# Altium footprint library PWR763A.PcbLib: 36 footprints (part 1 of 3)
Each footprint in its own frame and in the unit in brackets; x right, y up, seen from the top. Pads: shape width x height; smd on the part's side, far side on the other; paste and mask are expansions set on the pad; w line width, h text height; cw(c..) or ccw(c..) is an arc to the next point about the centre after c.
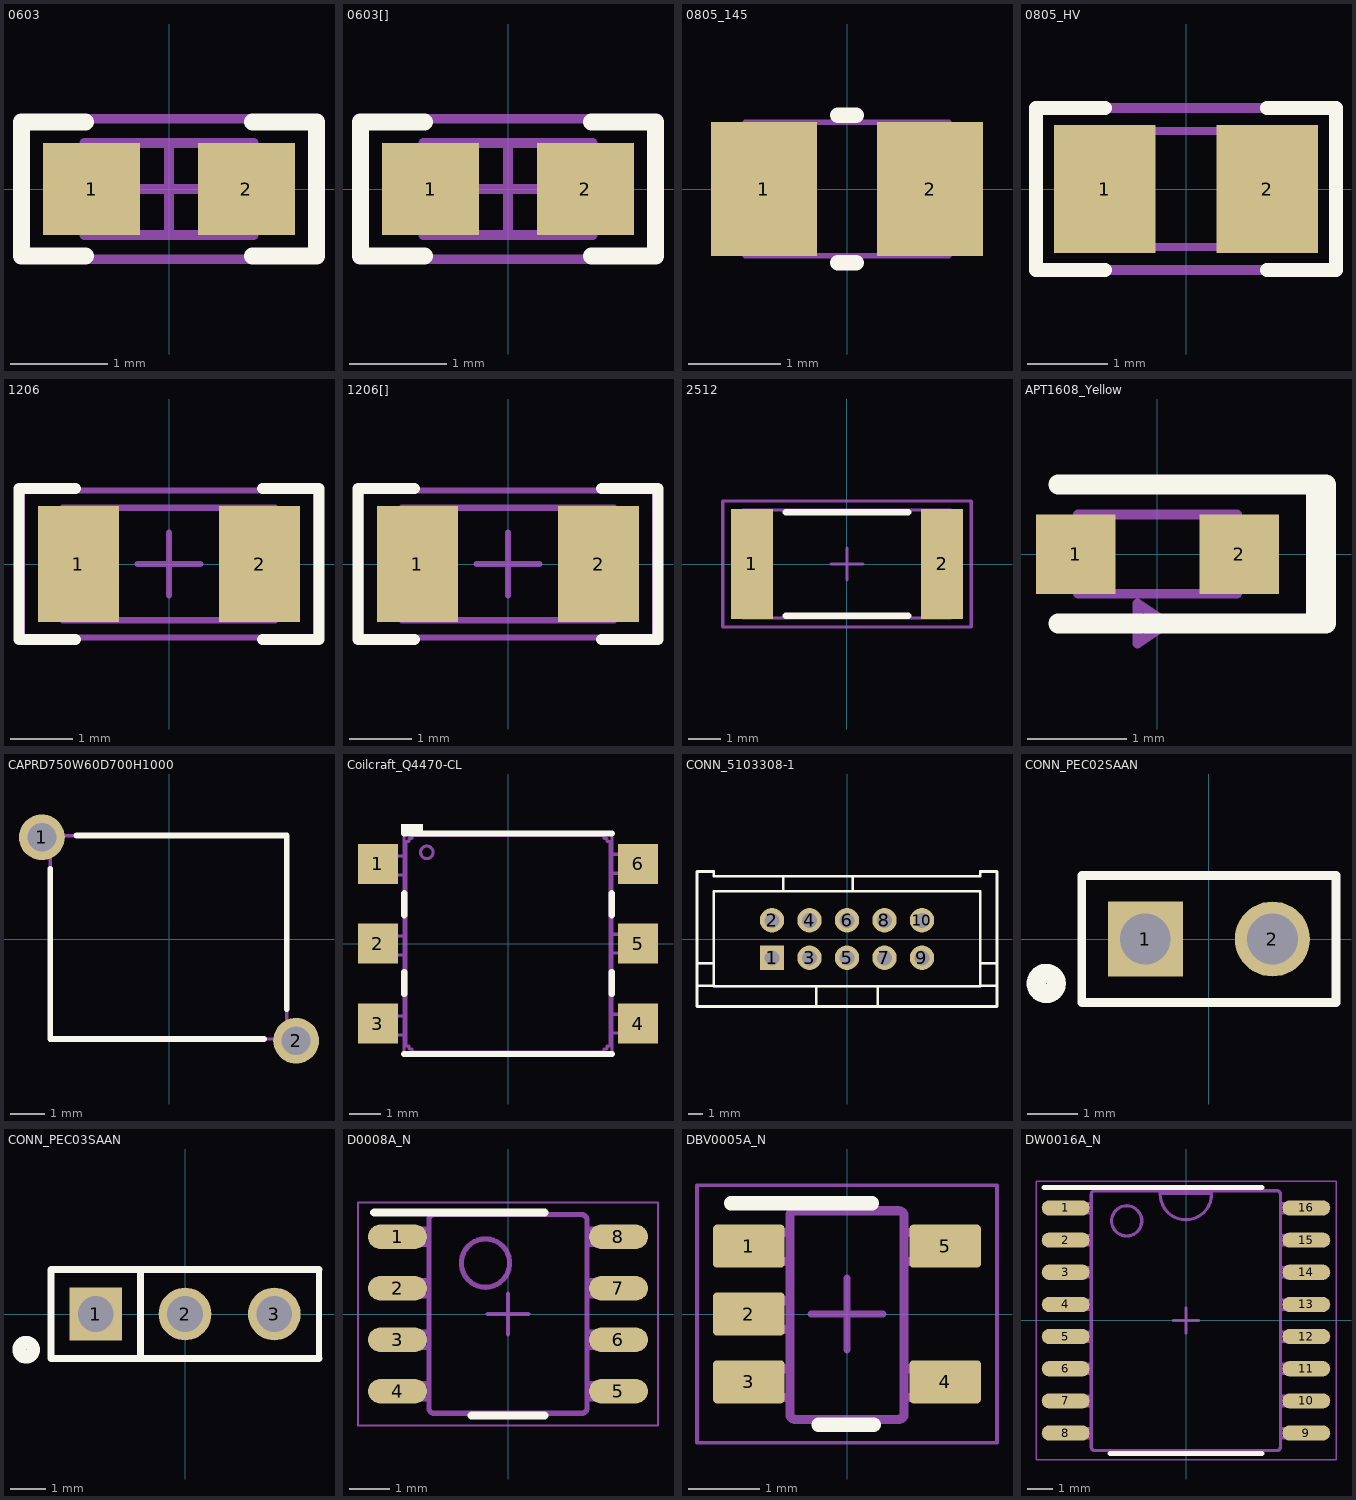
[diagram p0: the footprints below, top view; thin cyan lines are the x and y axes]

## 0603 [mm] "0603 from SM-752 data"
height 0.85
pads (2):
  rect 1x0.95 smd: 1(-0.8,0) 2(0.8,0)
Top Overlay:
  lines w0.178: -0.864,-0.691 -1.524,-0.691 -1.524,0.693 -0.864,0.693 ; 0.864,-0.691 1.524,-0.691 1.524,0.693 0.864,0.693
Mechanical 5:
  lines w0.1: -1.55,-0.725 1.55,-0.725 1.55,0.725 -1.55,0.725 -1.55,-0.725
Mechanical 13:
  lines w0.1: -0.55,-0.475 -0.55,0.475 ; 0.55,-0.475 0.55,0.475 ; -0.875,-0.475 -0.875,0.475 0.875,0.475 0.875,-0.475 -0.875,-0.475
Mechanical 15:
  lines w0.1: -0.475,0 0.475,0 ; 0,-0.475 0,0.475 ; -1.55,-0.725 -1.55,0.725 1.55,0.725 1.55,-0.725 -1.55,-0.725
3D body: height 0.85, standoff 0, extent 0.551,-0.474 0.874,0.474
3D body: height 0.85, standoff 0, extent -0.549,-0.474 0.549,0.474
3D body: height 0.85, standoff 0, extent -0.874,-0.474 -0.551,0.474

## 0603[] [mm] "0603 from SM-752 data"
height 0.85
pads (2):
  rect 1x0.95 smd: 1(-0.8,0) 2(0.8,0)
Top Overlay:
  lines w0.178: -0.864,-0.691 -1.524,-0.691 -1.524,0.693 -0.864,0.693 ; 0.864,-0.691 1.524,-0.691 1.524,0.693 0.864,0.693
Mechanical 5:
  lines w0.1: -1.55,-0.725 1.55,-0.725 1.55,0.725 -1.55,0.725 -1.55,-0.725
Mechanical 13:
  lines w0.1: -0.55,-0.475 -0.55,0.475 ; 0.55,-0.475 0.55,0.475 ; -0.875,-0.475 -0.875,0.475 0.875,0.475 0.875,-0.475 -0.875,-0.475
Mechanical 15:
  lines w0.1: -0.475,0 0.475,0 ; 0,-0.475 0,0.475 ; -1.55,-0.725 -1.55,0.725 1.55,0.725 1.55,-0.725 -1.55,-0.725
3D body: height 0.85, standoff 0, extent 0.551,-0.474 0.874,0.474
3D body: height 0.85, standoff 0, extent -0.549,-0.474 0.549,0.474
3D body: height 0.85, standoff 0, extent -0.874,-0.474 -0.551,0.474

## 0805_145 [mm] "0805 / 1.45mm height"
height 1.45
pads (2):
  rect 1.15x1.45 smd: 1(-0.9,0) 2(0.9,0)
Top Overlay:
  lines w0.17: -0.1,-0.8 0.1,-0.8 ; -0.1,0.8 0.1,0.8
Mechanical 5:
  lines w0.06: -1.1,-0.725 1.1,-0.725 1.1,0.725 -1.1,0.725 -1.1,-0.725
3D body: height 1.45, standoff 0, extent -1.099,-0.724 -0.501,0.724
3D body: height 1.45, standoff 0, extent -0.499,-0.724 0.5,0.725
3D body: height 1.45, standoff 0, extent 0.501,-0.724 1.099,0.724

## 0805_HV [mil] "0805 with 30mil clearance between pads"
height 57.09
pads (2):
  rect 50x63 smd: 1(-40,0) 2(40,0)
Top Overlay:
  lines w7: -40,-40 -74,-40 -74,0 -74,40 -40,40 ; 40,-40 74,-40 74,0 74,40 40,40
Mechanical 5:
  lines w5: -74,-40 -74,40 74,40 74,-40 -74,-40
Mechanical 13:
  lines w3.94: -25.59,-28.54 -25.59,28.54 ; 25.59,-28.54 25.59,28.54 ; -43.31,-28.54 -43.31,28.54 43.31,28.54 43.31,-28.54 -43.31,-28.54
3D body: height 57.09, standoff 0, extent 25.61,-28.52 43.29,28.52
3D body: height 57.09, standoff 0, extent -25.57,-28.52 25.57,28.52
3D body: height 57.09, standoff 0, extent -43.29,-28.52 -25.61,28.52

## 1206 [mm] "1206 from SM-752 data"
height 1.35
pads (2):
  rect 1.3x1.85 smd: 1(-1.45,0) 2(1.45,0)
Top Overlay:
  lines w0.178: -1.5,-1.21 -2.4,-1.21 -2.4,1.21 -1.5,1.21 ; 1.5,-1.21 2.4,-1.21 2.4,1.21 1.5,1.21
Mechanical 5:
  lines w0.1: -1.7,-0.9 1.7,-0.9 1.7,0.9 -1.7,0.9 -1.7,-0.9
Mechanical 13:
  lines w0.1: -1.2,-0.9 -1.2,0.9 ; 1.2,-0.9 1.2,0.9 ; -1.7,-0.9 1.7,-0.9 1.7,0.9 -1.7,0.9 -1.7,-0.9
Mechanical 15:
  lines w0.1: -0.5,0 0.5,0 ; 0,-0.5 0,0.5 ; -2.35,-1.175 2.35,-1.175 2.35,1.175 -2.35,1.175 -2.35,-1.175
3D body: height 1.35, standoff 0, extent -1.699,-0.899 -1.201,0.899
3D body: height 1.35, standoff 0, extent -1.199,-0.899 1.199,0.899
3D body: height 1.35, standoff 0, extent 1.201,-0.899 1.699,0.899

## 1206[] [mm] "1206 from SM-752 data"
height 1.35
pads (2):
  rect 1.3x1.85 smd: 1(-1.45,0) 2(1.45,0)
Top Overlay:
  lines w0.178: -1.5,-1.21 -2.4,-1.21 -2.4,1.21 -1.5,1.21 ; 1.5,-1.21 2.4,-1.21 2.4,1.21 1.5,1.21
Mechanical 5:
  lines w0.1: -1.7,-0.9 1.7,-0.9 1.7,0.9 -1.7,0.9 -1.7,-0.9
Mechanical 13:
  lines w0.1: -1.2,-0.9 -1.2,0.9 ; 1.2,-0.9 1.2,0.9 ; -1.7,-0.9 1.7,-0.9 1.7,0.9 -1.7,0.9 -1.7,-0.9
Mechanical 15:
  lines w0.1: -0.5,0 0.5,0 ; 0,-0.5 0,0.5 ; -2.35,-1.175 2.35,-1.175 2.35,1.175 -2.35,1.175 -2.35,-1.175
3D body: height 1.35, standoff 0, extent -1.699,-0.899 -1.201,0.899
3D body: height 1.35, standoff 0, extent -1.199,-0.899 1.199,0.899
3D body: height 1.35, standoff 0, extent 1.201,-0.899 1.699,0.899

## 2512 [mm] "Chip Resistor, Body 6.3x3.2mm, IPC Medium Density"
height 0.71
pads (2):
  rect 1.3x3.4 smd: 1(-2.95,0) 2(2.95,0)
Top Overlay:
  lines w0.2: -1.9,-1.6 1.9,-1.6 ; -1.9,1.6 1.9,1.6
Mechanical 5:
  lines w0.1: -3.225,-1.675 3.225,-1.675 3.225,1.675 -3.225,1.675 -3.225,-1.675
Mechanical 13:
  lines w0.1: -2.463,-1.675 -2.463,1.675 ; 2.463,-1.675 2.463,1.675 ; -3.225,-1.675 3.225,-1.675 3.225,1.675 -3.225,1.675 -3.225,-1.675
Mechanical 15:
  lines w0.1: -0.5,0 0.5,0 ; 0,-0.5 0,0.5 ; -3.85,-1.95 3.85,-1.95 3.85,1.95 -3.85,1.95 -3.85,-1.95
3D body: height 0.71, standoff 0, extent -3.224,-1.674 -2.464,1.674
3D body: height 0.71, standoff 0, extent -2.462,-1.674 2.462,1.674
3D body: height 0.71, standoff 0, extent 2.464,-1.674 3.224,1.674

## APT1608_Yellow [mm] "SMD, 2-Leads, Body 0.8x1.6mm"
height 0.75
pads (2):
  rect 0.8x0.8 smd: 1(-0.825,0) 2(0.825,0)
Top Overlay:
  rectangle: 1.5,-0.7 1.8,0.7
  lines w0.2: -1,-0.7 1.7,-0.7 ; -1,0.7 1.7,0.7
Mechanical 5:
  rectangle: 0.6,-0.4 0.8,0.4
  lines w0.1: -0.8,-0.4 0.8,-0.4 0.8,0.4 -0.8,0.4 -0.8,-0.4 ; -0.2,-0.9 -0.2,-0.5 0.1,-0.7 -0.2,-0.9
3D body: height 0.75, standoff 0, extent -0.801,-0.4 0.81,0.4
3D body: height 0.76, standoff 0.7, extent 0.15,-0.1 0.35,0.1

## CAPRD750W60D700H1000 [mm] "muRata"
height 10
pads (2):
  round 1.35 hole 0.85: 1(-3.75,3) 2(3.75,-3)
Top Overlay:
  lines w0.17: -3.5,2.075 -3.5,-2.95 2.8,-2.95 ; -2.725,3.05 3.475,3.05 3.475,-2.075
Mechanical 5:
  lines w0.1: -3.5,-2.95 -3.5,3.05 3.475,3.05 3.475,-2.95 -3.5,-2.95
3D body: height 7, standoff 3, extent -4.259,2.491 -3.241,3.509
3D body: height 7, standoff 3, extent 3.241,-3.509 4.259,-2.491
3D body: height 9.97, standoff 3, extent -3.493,-2.95 3.493,3.05
3D body: height 6, standoff -2, extent -4.047,2.701 -3.45,3.3
3D body: height 6, standoff -2, extent 3.453,-3.299 4.05,-2.7

## Coilcraft_Q4470-CL [mm] "SMD, 6-Leads, Body 6.6x6.99mm, Pitch 2.54mm"
height 5.46
pads (6):
  rect 1.27x1.27 smd: 1(-4.13,2.54) 2(-4.13,0) 3(-4.13,-2.54) 4(4.13,-2.54) 5(4.13,0) 6(4.13,2.54)
Top Overlay:
  rectangle: -3.4,3.5 -2.7,3.8
  lines w0.2: -3.3,-3.5 3.3,-3.5 ; -3.3,-1.6 -3.3,-0.9 ; -3.3,0.9 -3.3,1.6 ; -3.3,3.5 3.3,3.5 ; 3.3,-1.6 3.3,-0.9 ; 3.3,0.9 3.3,1.6
Mechanical 5:
  lines w0.1: -3.3,-2.895 -3.605,-2.895 ; -3.3,-2.295 -3.605,-2.295 ; -3.3,-0.355 -3.605,-0.355 ; -3.3,0.245 -3.605,0.245 ; -3.3,2.185 -3.605,2.185 ; -3.3,2.785 -3.605,2.785 ; -1.35,-3.445 -1.35,-3.495 -3.3,-3.495 -3.3,3.495 -1.35,3.495 -1.35,3.445 ; 1.35,-3.445 1.35,-3.495 3.3,-3.495 3.3,3.495 1.35,3.495 1.35,3.445 ; 3.3,-2.84 3.639,-2.84 ; 3.3,-2.24 3.639,-2.24 ; 3.3,-0.3 3.639,-0.3 ; 3.3,0.3 3.639,0.3 ; 3.3,2.24 3.639,2.24 ; 3.3,2.84 3.639,2.84 ; -3.855,-2.895 -4.25,-2.895 -4.25,-2.295 -3.855,-2.295 ; -3.855,-2.895 -3.605,-2.895 ; -3.855,-2.895 -3.855,-2.295 ; -3.855,-2.295 -3.605,-2.295 ; -3.855,-0.355 -3.605,-0.355 ; -3.855,-0.355 -3.855,0.245 ; -3.855,-0.355 -4.25,-0.355 -4.25,0.245 -3.855,0.245 ; -3.855,0.245 -3.605,0.245 ; -3.855,2.185 -4.25,2.185 -4.25,2.785 -3.855,2.785 ; -3.855,2.185 -3.855,2.785 ; -3.855,2.185 -3.605,2.185 ; -3.855,2.785 -3.605,2.785 ; -3.605,-2.895 -3.605,-2.295 ; -3.605,-0.355 -3.605,0.245 ; -3.605,2.185 -3.605,2.785 ; 3.639,-2.84 3.639,-2.24 ; 3.639,-2.84 3.889,-2.84 ; 3.639,-2.24 3.889,-2.24 ; 3.639,-0.3 3.639,0.3 ; 3.639,-0.3 3.889,-0.3 ; 3.639,0.3 3.889,0.3 ; 3.639,2.24 3.639,2.84 ; 3.639,2.24 3.889,2.24 ; 3.639,2.84 3.889,2.84 ; 3.889,-2.84 4.25,-2.84 4.25,-2.24 3.889,-2.24 ; 3.889,-2.84 3.889,-2.24 ; 3.889,-0.3 3.889,0.3 ; 3.889,-0.3 4.25,-0.3 4.25,0.3 3.889,0.3 ; 3.889,2.24 3.889,2.84 ; 3.889,2.24 4.25,2.24 4.25,2.84 3.889,2.84 ; -3.25,-3.245 -3.15,-3.245 -3.15,-3.345 -3.05,-3.345 -3.05,-3.445 3.05,-3.445 3.05,-3.345 3.15,-3.345 3.15,-3.245 3.25,-3.245 3.25,3.245 3.15,3.245 3.15,3.345 3.05,3.345 3.05,3.445 -3.05,3.445 -3.05,3.345 -3.15,3.345 -3.15,3.245 -3.25,3.245 -3.25,-3.245 ; -2.579,2.705 ccw(c-2.579,2.904) -2.579,3.103 ccw(c-2.579,2.904) -2.579,2.705
3D body: height 5.46, standoff 0, extent -4.25,-3.495 4.25,3.495

## CONN_5103308-1 [mm] "TE Connectivity (AMP) Rev E datasheet"
height 9.982
pads (10):
  rect 1.65x1.65 hole 1.016: 1(-5.08,-1.27)
  round 1.65 hole 1.016: 2(-5.08,1.27) 3(-2.54,-1.27) 4(-2.54,1.27) 5(0,-1.27) 6(0,1.27) 7(2.54,-1.27) 8(2.54,1.27) 9(5.08,-1.27) 10(5.08,1.27)
Top Overlay:
  lines w0.178: -10.16,-3.175 -10.16,-4.572 -2.603,-4.572 -2.095,-4.572 ; -10.16,-3.175 -10.16,-1.651 ; -10.16,-3.175 -9.398,-3.175 -9.017,-3.175 ; -10.16,-1.651 -10.16,4.572 -9.017,4.572 -9.017,4.255 -4.826,4.255 -4.318,4.255 ; -10.16,-1.651 -9.398,-1.651 -9.017,-1.651 ; -9.017,-3.175 -9.017,-3.213 -2.112,-3.213 -2.095,-3.213 ; -9.017,-3.175 -9.017,-1.651 ; -9.017,-1.651 -9.017,3.238 -4.334,3.238 -4.318,3.238 ; -4.318,3.238 0.381,3.238 ; -4.318,3.238 -4.318,4.255 ; -4.318,4.255 -3.556,4.255 -0.381,4.255 0.381,4.255 ; -2.095,-4.572 -1.333,-4.572 1.333,-4.572 2.095,-4.572 ; -2.095,-4.572 -2.095,-3.213 ; -2.095,-3.213 2.095,-3.213 ; 0.381,3.238 0.381,4.255 ; 0.381,3.238 0.397,3.238 9.017,3.238 9.017,-1.651 ; 0.381,4.255 0.889,4.255 9.017,4.255 9.017,4.572 10.16,4.572 10.16,-1.651 ; 2.095,-4.572 2.603,-4.572 10.16,-4.572 10.16,-3.175 ; 2.095,-4.572 2.095,-3.213 ; 2.095,-3.213 2.112,-3.213 9.017,-3.213 9.017,-3.175 ; 9.017,-3.175 9.017,-1.651 ; 9.017,-3.175 9.398,-3.175 10.16,-3.175 ; 9.017,-1.651 9.398,-1.651 10.16,-1.651 ; 10.16,-3.175 10.16,-1.651
Mechanical 5:
  rectangle: -5.588,-1.778 -4.572,-0.762
  lines w0.127: -10.16,-3.175 -9.398,-3.175 -9.017,-3.175 ; -10.16,-3.175 -10.16,-1.651 ; -10.16,-3.175 -10.16,-4.572 -2.603,-4.572 -2.095,-4.572 ; -10.16,-1.651 -9.398,-1.651 -9.017,-1.651 ; -10.16,-1.651 -10.16,4.572 -9.017,4.572 -9.017,4.255 -4.826,4.255 -4.318,4.255 ; -9.017,-3.175 -9.017,-1.651 ; -9.017,-3.175 -9.017,-3.213 -2.112,-3.213 -2.095,-3.213 ; -9.017,-1.651 -9.017,3.238 -4.334,3.238 -4.318,3.238 ; -4.318,3.238 -4.318,4.255 ; -4.318,3.238 0.381,3.238 ; -4.318,4.255 -3.556,4.255 -0.381,4.255 0.381,4.255 ; -2.095,-4.572 -2.095,-3.213 ; -2.095,-4.572 -1.333,-4.572 1.333,-4.572 2.095,-4.572 ; -2.095,-3.213 2.095,-3.213 ; 0.381,3.238 0.397,3.238 9.017,3.238 9.017,-1.651 ; 0.381,3.238 0.381,4.255 ; 0.381,4.255 0.889,4.255 9.017,4.255 9.017,4.572 10.16,4.572 10.16,-1.651 ; 2.095,-4.572 2.095,-3.213 ; 2.095,-4.572 2.603,-4.572 10.16,-4.572 10.16,-3.175 ; 2.095,-3.213 2.112,-3.213 9.017,-3.213 9.017,-3.175 ; 9.017,-3.175 9.398,-3.175 10.16,-3.175 ; 9.017,-3.175 9.017,-1.651 ; 9.017,-1.651 9.398,-1.651 10.16,-1.651 ; 10.16,-3.175 10.16,-1.651 ; -5.391,-1.581 -4.769,-1.581 -4.769,-0.959 -5.391,-0.959 -5.391,-1.581
3D body: height 9.87, standoff -3.03, extent -10.16,-4.572 10.16,4.572

## CONN_PEC02SAAN [mm] "SULLINS"
height 8.38
pads (2):
  rect 1.5x1.5 hole 1.016: 1(-1.27,0)
  round 1.5 hole 1.016: 2(1.27,0)
Top Overlay:
  circle w0.381: c-3.251,-0.889 r0.203
  lines w0.178: -2.54,-1.27 2.54,-1.27 2.54,1.27 -2.54,1.27 -2.54,-1.27
Mechanical 5:
  lines w0.127: -2.54,-1.27 -2.54,1.27 2.54,1.27 2.54,-1.27 -2.54,-1.27
3D body: height 8.38, standoff -3.05, extent 0.966,-0.304 1.574,0.304
3D body: height 8.38, standoff -3.05, extent -1.574,-0.304 -0.966,0.304
3D body: height 2.54, standoff 0, extent -2.539,-1.269 2.539,1.269

## CONN_PEC03SAAN [mm] "SULLINS"
height 8.38
pads (3):
  rect 1.5x1.5 hole 1.016: 1(-2.54,0)
  round 1.5 hole 1.016: 2(0,0) 3(2.54,0)
Top Overlay:
  circle w0.381: c-4.521,-1.016 r0.203
  lines w0.178: 3.81,-1.27 3.81,0.254 3.81,1.27
  lines w0.203: -1.27,1.27 -1.27,-1.27 ; 3.81,-1.27 -1.27,-1.27 ; 3.81,1.27 -3.81,1.27 -3.81,-1.27 -1.27,-1.27
Mechanical 5:
  rectangle: -3.048,-0.508 -2.032,0.508
  lines w0.127: -3.81,-1.27 -3.81,1.27 3.81,1.27 3.81,-1.27 -3.81,-1.27
3D body: height 8.38, standoff -3.05, extent 2.236,-0.304 2.844,0.304
3D body: height 8.38, standoff -3.05, extent -0.304,-0.304 0.304,0.304
3D body: height 8.38, standoff -3.05, extent -2.844,-0.304 -2.236,0.304
3D body: height 2.54, standoff 0, extent -3.835,-1.295 3.835,1.295

## D0008A_N [mm] "SOIC, 8-Leads, Body 4.9x3.9mm, Pitch 1.27mm, IPC Medium Density"
height 1.75
pads (8):
  oval 1.45x0.6 smd: 1(-2.725,1.905) 2(-2.725,0.635) 3(-2.725,-0.635) 4(-2.725,-1.905) 5(2.725,-1.905) 6(2.725,-0.635) 7(2.725,0.635) 8(2.725,1.905)
Top Overlay:
  lines w0.2: -3.3,2.5 0.9,2.5 ; -0.9,-2.5 0.9,-2.5
Mechanical 5:
  lines w0.127: -2.375,-2.095 -2.375,-1.715 ; -2.375,-2.095 -2.589,-2.095 -3.002,-2.095 -3.002,-1.715 -2.589,-1.715 -2.375,-1.715 ; -2.375,-2.095 -1.995,-2.095 -1.952,-2.095 -1.952,-1.715 -1.995,-1.715 -2.375,-1.715 ; -2.375,-0.825 -2.375,-0.445 ; -2.375,-0.825 -2.589,-0.825 -3.002,-0.825 -3.002,-0.445 -2.589,-0.445 -2.375,-0.445 ; -2.375,-0.825 -1.995,-0.825 -1.952,-0.825 -1.952,-0.445 -1.995,-0.445 -2.375,-0.445 ; -2.375,0.445 -2.375,0.825 ; -2.375,0.445 -2.589,0.445 -3.002,0.445 -3.002,0.825 -2.589,0.825 -2.375,0.825 ; -2.375,0.445 -1.995,0.445 -1.952,0.445 -1.952,0.825 -1.995,0.825 -2.375,0.825 ; -2.375,1.715 -2.375,2.095 ; -2.375,1.715 -2.589,1.715 -3.002,1.715 -3.002,2.095 -2.589,2.095 -2.375,2.095 ; -2.375,1.715 -1.995,1.715 -1.952,1.715 -1.952,2.095 -1.995,2.095 -2.375,2.095 ; -0.332,-2.45 -0.182,-2.45 ; -0.332,-2.45 -0.182,-2.45 ; -0.332,-2.45 -1.825,-2.45 -1.826,-2.45 cw(c-1.825,-2.323) -1.952,-2.324 -1.952,-2.323 -1.952,2.323 -1.952,2.324 cw(c-1.825,2.323) -1.826,2.45 -1.825,2.45 -0.332,2.45 ; -0.332,2.45 -0.182,2.45 ; -0.332,2.45 -0.182,2.45 ; -0.182,-2.45 0.178,-2.45 ; -0.182,2.45 0.178,2.45 ; 0.178,-2.45 0.328,-2.45 ; 0.178,-2.45 0.328,-2.45 ; 0.178,2.45 0.328,2.45 ; 0.178,2.45 0.328,2.45 ; 0.328,-2.45 1.821,-2.45 1.822,-2.45 ccw(c1.821,-2.323) 1.948,-2.324 1.948,-2.323 1.948,2.323 1.948,2.324 ccw(c1.821,2.323) 1.822,2.45 1.821,2.45 0.328,2.45 ; 2.371,-2.095 2.371,-1.715 ; 2.371,-2.095 1.991,-2.095 1.948,-2.095 1.948,-1.715 1.991,-1.715 2.371,-1.715 ; 2.371,-2.095 2.585,-2.095 2.998,-2.095 2.998,-1.715 2.585,-1.715 2.371,-1.715 ; 2.371,-0.825 2.371,-0.445 ; 2.371,-0.825 1.991,-0.825 1.948,-0.825 1.948,-0.445 1.991,-0.445 2.371,-0.445 ; 2.371,-0.825 2.585,-0.825 2.998,-0.825 2.998,-0.445 2.585,-0.445 2.371,-0.445 ; 2.371,0.445 2.371,0.825 ; 2.371,0.445 1.991,0.445 1.948,0.445 1.948,0.825 1.991,0.825 2.371,0.825 ; 2.371,0.445 2.585,0.445 2.998,0.445 2.998,0.825 2.585,0.825 2.371,0.825 ; 2.371,1.715 2.371,2.095 ; 2.371,1.715 1.991,1.715 1.948,1.715 1.948,2.095 1.991,2.095 2.371,2.095 ; 2.371,1.715 2.585,1.715 2.998,1.715 2.998,2.095 2.585,2.095 2.371,2.095 ; -0.555,0.659 ccw(c-0.555,1.256) -0.555,1.853 ccw(c-0.555,1.256) -0.555,0.659
Mechanical 15:
  lines w0.05: -3.7,-2.75 -3.7,2.75 3.7,2.75 3.7,-2.75 -3.7,-2.75
  lines w0.1: -0.5,0 0.5,0 ; 0,-0.5 0,0.5
3D body: height 1.63, standoff 0, extent -3,-2.45 3,2.45

## DBV0005A_N [mm] "SOT23, 5-Leads, Body 2.9x1.6mm, Pitch 0.95mm, Lead Span 2.8mm, IPC Medium Density"
height 1.45
pads (5):
  rrect17% 1x0.6 smd: 1(-1.375,0.95) 2(-1.375,0) 3(-1.375,-0.95) 4(1.375,-0.95) 5(1.375,0.95)
Top Overlay:
  lines w0.2: -1.625,1.55 0.35,1.55 ; -0.4,-1.55 0.375,-1.55
Mechanical 5:
  lines w0.127: -0.801,1.371 cw(c-0.725,1.37) -0.725,1.446 ; -0.801,1.37 -0.801,1.371 ; -0.801,1.37 -0.801,-1.399 -0.801,-1.4 ccw(c-0.725,-1.399) -0.725,-1.475 ; -0.725,-1.475 0.723,-1.475 0.724,-1.475 ccw(c0.723,-1.399) 0.799,-1.4 0.799,-1.399 0.799,1.37 ; -0.725,-1.475 -0.725,-1.475 ; -0.725,1.446 -0.725,1.446 ; -0.725,1.446 0.723,1.446 0.724,1.446 cw(c0.723,1.37) 0.799,1.371 ; 0.799,1.37 0.799,1.371 ; -1.423,-1.167 -1.423,-0.767 -1.199,-0.767 -1.105,-0.767 -1.088,-0.767 -0.835,-0.767 -0.801,-0.767 -0.801,-1.167 -0.835,-1.167 -1.088,-1.167 -1.105,-1.167 -1.199,-1.167 -1.423,-1.167 ; -1.423,-0.215 -1.423,0.186 -1.199,0.186 -1.105,0.186 -1.088,0.186 -0.835,0.186 -0.801,0.186 -0.801,-0.215 -0.835,-0.215 -1.088,-0.215 -1.105,-0.215 -1.199,-0.215 -1.423,-0.215 ; -1.423,0.738 -1.423,1.138 -1.199,1.138 -1.105,1.138 -1.088,1.138 -0.835,1.138 -0.801,1.138 -0.801,0.738 -0.835,0.738 -1.088,0.738 -1.105,0.738 -1.199,0.738 -1.423,0.738 ; 0.799,-1.167 0.834,-1.167 1.087,-1.167 1.103,-1.167 1.198,-1.167 1.422,-1.167 1.422,-0.767 1.198,-0.767 1.103,-0.767 1.087,-0.767 0.834,-0.767 0.799,-0.767 0.799,-1.167 ; 0.799,0.738 0.834,0.738 1.087,0.738 1.103,0.738 1.198,0.738 1.422,0.738 1.422,1.138 1.198,1.138 1.103,1.138 1.087,1.138 0.834,1.138 0.799,1.138 0.799,0.738
Mechanical 15:
  lines w0.05: -2.1,-1.8 -2.1,1.8 2.1,1.8 2.1,-1.8 -2.1,-1.8
  lines w0.1: -0.5,0 0.5,0 ; 0,-0.5 0,0.5
3D body: height 1.09, standoff 0, extent -1.422,-1.461 1.423,1.46

## DW0016A_N [mm] "SOIC, 16-Leads, Body 10.3x7.5mm, Pitch 1.27mm, IPC Medium Density"
height 2.64
pads (16):
  oval 1.9x0.6 smd: 1(-4.75,4.445) 2(-4.75,3.175) 3(-4.75,1.905) 4(-4.75,0.635) 5(-4.75,-0.635) 6(-4.75,-1.905) 7(-4.75,-3.175) 8(-4.75,-4.445) 9(4.75,-4.445) 10(4.75,-3.175) 11(4.75,-1.905) 12(4.75,-0.635) 13(4.75,0.635) 14(4.75,1.905) 15(4.75,3.175) 16(4.75,4.445)
Top Overlay:
  lines w0.2: -5.6,5.25 3,5.25 ; -3,-5.25 3,-5.25
Mechanical 5:
  drawing of 193 lines, arcs and shapes, not listed
Mechanical 15:
  lines w0.05: -5.925,-5.5 5.925,-5.5 5.925,5.5 -5.925,5.5 -5.925,-5.5
  lines w0.1: -0.5,0 0.5,0 ; 0,-0.5 0,0.5
3D body: height 2.54, standoff 0, extent -5.143,-5.131 5.144,5.131